# Altium footprint library SYNCBOX_V3I1.PcbLib: 251 footprints (part 8 of 16)
Each footprint in its own frame and in the unit in brackets; x right, y up, seen from the top. Pads: shape width x height; smd on the part's side, far side on the other; paste and mask are expansions set on the pad; w line width, h text height; cw(c..) or ccw(c..) is an arc to the next point about the centre after c.
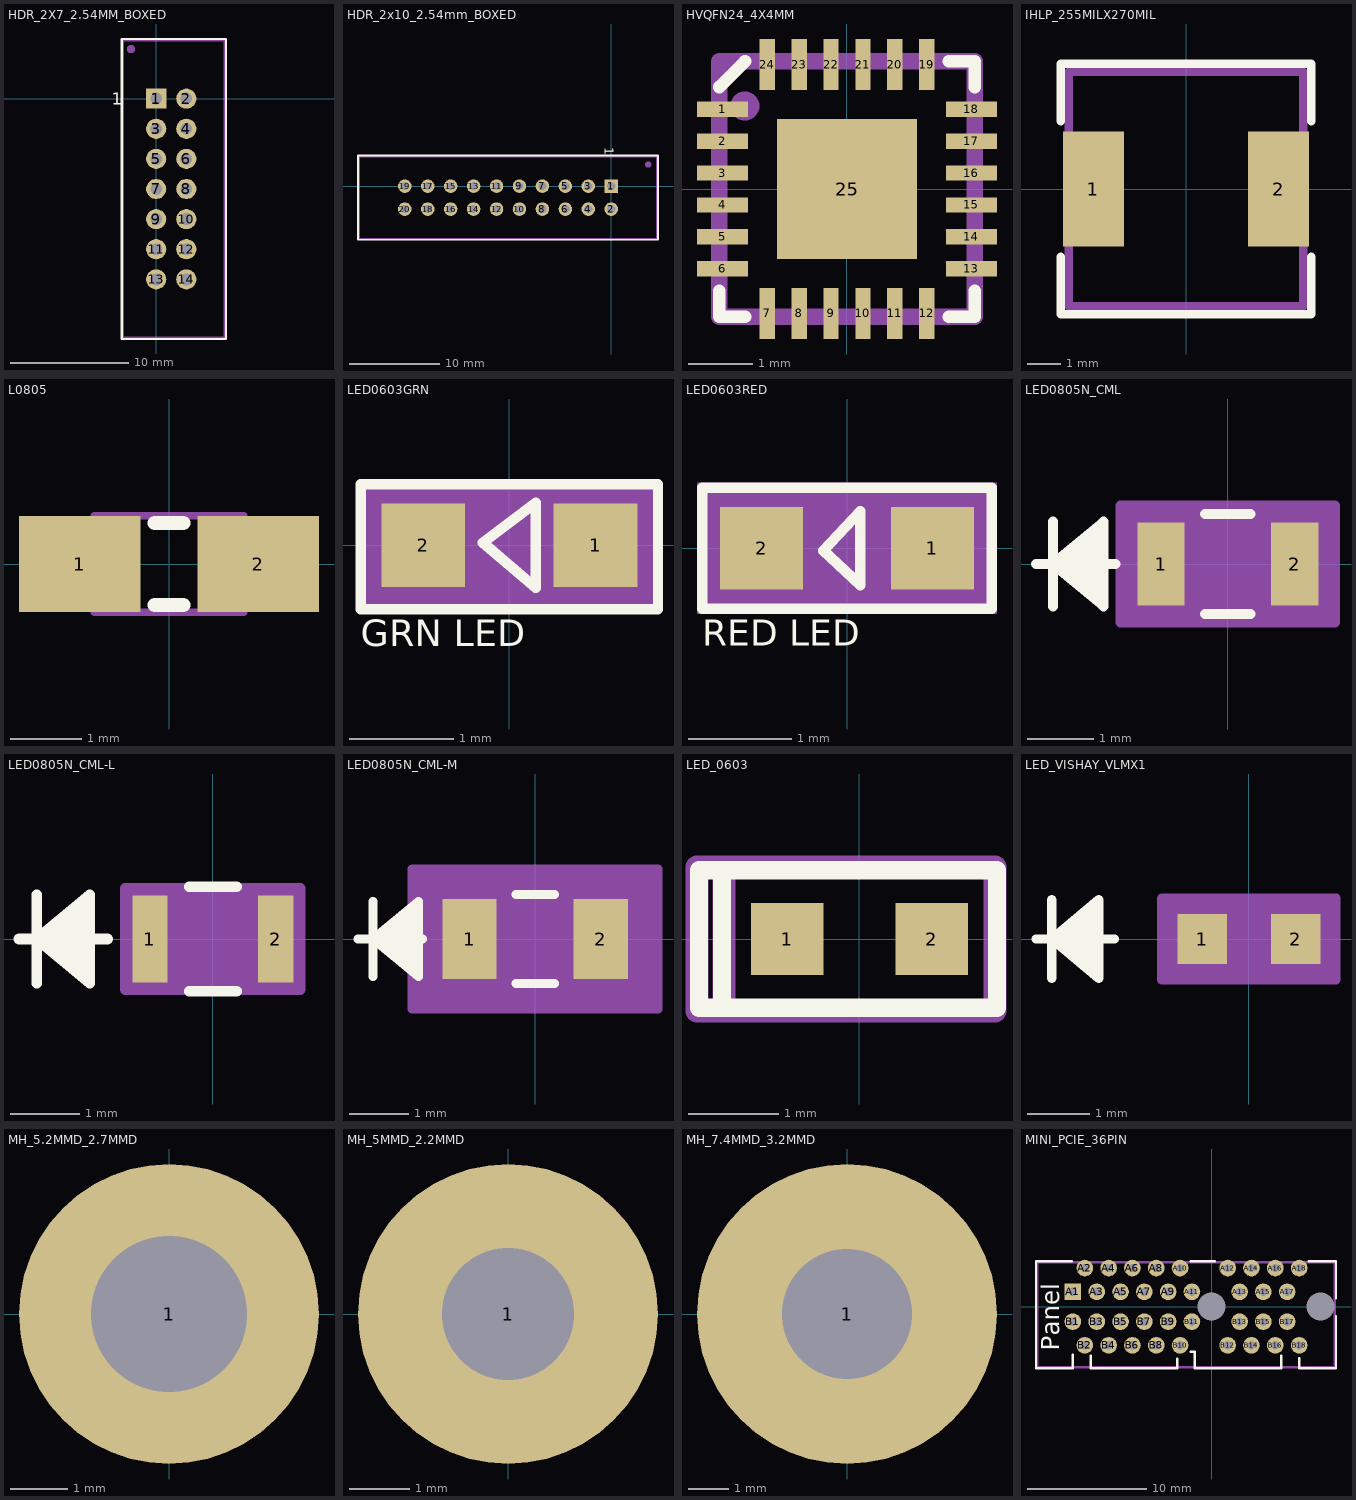
[diagram p7: the footprints below, top view; thin cyan lines are the x and y axes]

## HDR_2X7_2.54MM_BOXED [mm]
pads (14):
  rect 1.7x1.7 hole 1: 1(0,0)
  round 1.7 hole 1: 2(2.54,0) 3(0,-2.54) 4(2.54,-2.54) 5(0,-5.08) 6(2.54,-5.08) 7(0,-7.62) 8(2.54,-7.62) 9(0,-10.16) 10(2.54,-10.16) 11(0,-12.7) 12(2.54,-12.7) 13(0,-15.24) 14(2.54,-15.24)
Top Overlay:
  lines w0.2: -2.9,-20.27 5.89,-20.27 5.89,5.03 -2.9,5.03 -2.9,-20.27
  text "1" at -3.73,-0.53 h1.02
Mechanical 16:
  circle w0.5: c-2.13,4.18 r0.1
  lines w0.2: -2.8,-20.17 5.79,-20.17 5.79,4.93 -2.8,4.93 -2.8,-20.17
Mechanical 29:
  text ".Designator" at 2,-9.5 h1.52
3D body "30314-6002.stp": height 8.89, standoff -3.17, extent -2.91,-20.312 5.904,5.062

## HDR_2x10_2.54mm_BOXED [mm]
pads (20):
  rect 1.5x1.5 hole 0.9: 1(0,0)
  round 1.5 hole 0.9: 2(0,-2.54) 3(-2.54,0) 4(-2.54,-2.54) 5(-5.08,0) 6(-5.08,-2.54) 7(-7.62,0) 8(-7.62,-2.54) 9(-10.16,0) 10(-10.16,-2.54) 11(-12.7,0) 12(-12.7,-2.54) 13(-15.24,0) 14(-15.24,-2.54) 15(-17.78,0) 16(-17.78,-2.54) 17(-20.32,0) 18(-20.32,-2.54) 19(-22.86,0) 20(-22.86,-2.54)
Top Overlay:
  lines w0.2: -28.04,-5.942 5.18,-5.942 5.18,3.4 5.178,3.402 -28.04,3.402 -28.04,-5.942
  text "1" at -0.7,4.3 h1.02
Mechanical 16:
  circle w0.5: c4.1,2.4 r0.1
  lines w0.2: -27.94,-5.842 5.08,-5.842 5.08,3.302 -27.94,3.302 -27.94,-5.842
Mechanical 29:
  text ".Designator" at -13.5,-2 h1.52
3D body "c-5103308-5-b-3d.stp": height 9.9, standoff -3, extent -27.935,-5.847 5.085,3.297

## HVQFN24_4X4MM [mm]
pads (25):
  rect 0.8x0.24 smd mask+0.025: 1(-1.95,1.25) 2(-1.95,0.75) 3(-1.95,0.25) 4(-1.95,-0.25) 5(-1.95,-0.75) 6(-1.95,-1.25) 13(1.95,-1.25) 14(1.95,-0.75) 15(1.95,-0.25) 16(1.95,0.25) 17(1.95,0.75) 18(1.95,1.25)
  rect 0.24x0.8 smd mask+0.025: 7(-1.25,-1.95) 8(-0.75,-1.95) 9(-0.25,-1.95) 10(0.25,-1.95) 11(0.75,-1.95) 12(1.25,-1.95) 19(1.25,1.95) 20(0.75,1.95) 21(0.25,1.95) 22(-0.25,1.95) 23(-0.75,1.95) 24(-1.25,1.95)
  rect 2.2x2.2 smd mask+0.025: 25(0,0)
Top Overlay:
  lines w0.2: -2,-1.6 -2,-2 -1.6,-2 ; -2,1.6 -1.6,2 ; 1.6,-2 2,-2 2,-1.6 ; 1.6,2 2,2 2,1.6
Mechanical 16:
  circle w0.254: c-1.6,1.3 r0.1
  lines w0.254: -2,-2 -2,2 2,2 2,-2 -2,-2
Mechanical 29:
  text ".Designator" at -0.2,0.7 h0.6
3D body: height 1, standoff 0, extent -2,-2 2,2

## IHLP_255MILX270MIL [mil]
pads (2):
  rect 72x135 smd: 1(-109,0) 2(109,0)
Top Overlay:
  lines w10: -147.64,-80 -147.64,-147.64 147.64,-147.64 147.64,-80 ; -147.64,80 -147.64,147.64 147.64,147.64 147.64,80
Mechanical 16:
  lines w10: -137.8,-137.8 137.8,-137.8 137.8,137.8 -137.8,137.8 -137.8,-137.8
Mechanical 29:
  text ".Designator" at -43.31,-27.56 h60
3D body: height 118.11, standoff 0, extent -95.72,-130 95.77,130.01
3D body: height 118.11, standoff 0, extent -119.25,-130 -72.19,-82.85
3D body: height 118.11, standoff 0, extent -119.25,82.94 -72.1,130
3D body: height 118.11, standoff 0, extent 72.19,82.95 119.34,130.01
3D body: height 118.11, standoff 0, extent 72.2,-130 119.25,-82.85
3D body: height 118.11, standoff 0, extent 95.63,-106.43 119.34,106.57
3D body: height 118.11, standoff 0, extent -119.25,-106.42 -95.53,106.57
3D body: height 78.74, standoff 0, extent -134.93,-62.92 -119.18,63.07
3D body: height 78.74, standoff 0, extent 119.34,-62.92 135.09,63.06

## L0805 [mm]
height 1.45
pads (2):
  rect 1.7x1.35 smd: 1(-1.25,0) 2(1.25,0)
Top Overlay:
  lines w0.2: -0.2,-0.575 0.2,-0.575 ; -0.2,0.575 0.2,0.575
Mechanical 13:
  lines w0.1: -1.05,-0.675 -1.05,0.675 1.05,0.675 1.05,-0.675 -1.05,-0.675
3D body: height 1.45, standoff 0, extent -1.05,-0.675 1.05,0.675

## LED0603GRN [mm]
pads (2):
  rect 0.8x0.8 smd: 1(0.825,0) 2(-0.825,0)
Top Overlay:
  lines w0.1: -1.422,-0.61 1.422,-0.61 1.422,0.584 -1.422,0.584 -1.422,0.403 -1.422,-0.61 ; -0.254,0.025 0.254,0.406 0.254,-0.406 -0.254,0.025
  text "GRN LED" at -1.422,-0.965 h0.25
Mechanical 15:
  rectangle: -1.448,-0.584 1.397,0.61
3D body "APT1608.STEP": height 0.75, standoff 0, extent -0.759,-0.4 0.852,0.4

## LED0603RED [mm]
pads (2):
  rect 0.8x0.8 smd: 1(0.825,0) 2(-0.825,0)
Top Overlay:
  lines w0.1: -1.397,-0.584 -1.397,0.584 1.397,0.584 1.397,-0.584 -1.397,-0.584
  lines w0.102: -0.229,-0.024 0.127,0.356 0.127,-0.356 -0.229,-0.024
  text "RED LED" at -1.397,-0.94 h0.25
Mechanical 15:
  rectangle: -1.448,-0.635 1.448,0.635
3D body "APT1608.STEP": height 0.75, standoff 0, extent -0.806,-0.406 0.805,0.394

## LED0805N_CML [mil]
pads (2):
  rect 28x49 smd paste+0 mask+0: 1(-39.5,0) 2(39.5,0)
Top Overlay:
  lines w6: -113.5,0 -66.6,0 ; -103.5,-25 -103.5,25 ; -73.5,-20 -103.5,0 ; -73.5,-15 -103.5,0 ; -73.5,-10 -103.5,0 ; -73.5,-5 -103.5,0 ; -73.5,5 -103.5,0 ; -73.5,10 -103.5,0 ; -73.5,15 -103.5,0 ; -73.5,20 -103.5,0 ; -13.39,-29.5 13.39,-29.5 ; -13.39,29.5 13.39,29.5 ; -103.5,0 -73.5,-25 -73.5,25 -103.5,0
Mechanical 13:
  lines w1: -113.5,0 -63.5,0 ; -103.5,-25 -103.5,25 ; -73.5,-20 -103.5,0 ; -73.5,-15 -103.5,0 ; -73.5,-10 -103.5,0 ; -73.5,-5 -103.5,0 ; -73.5,5 -103.5,0 ; -73.5,10 -103.5,0 ; -73.5,15 -103.5,0 ; -73.5,20 -103.5,0 ; -103.5,0 -73.5,-25 -73.5,25 -103.5,0 ; -39.5,-24.5 -39.5,24.5 ; -39.5,-24.5 39.5,-24.5 ; -39.5,-24.5 -25.5,-24.5 -25.5,24.5 -39.5,24.5 ; -39.5,-24.5 -39.5,24.5 ; -39.5,24.5 39.5,24.5 ; 39.5,-24.5 39.5,24.5 ; 39.5,-24.5 39.5,24.5 ; 39.5,-24.5 25.5,-24.5 25.5,24.5 39.5,24.5
Mechanical 15:
  region: 63.5,-34.5 -63.5,-34.5 -63.5,34.5 63.5,34.5
  lines w6: -63.5,-34.5 63.5,-34.5 63.5,34.5 -63.5,34.5 -63.5,-34.5
3D body: height 10, standoff 0, extent 0,0 10,10
3D body "LED0805N_CML.step": height 30.98, standoff 0, extent -39.49,-24.49 39.49,24.49

## LED0805N_CML-L [mil]
pads (2):
  rect 20x49 smd paste+0 mask+0: 1(-35.5,0) 2(35.5,0)
Top Overlay:
  lines w6: -109.5,0 -59.5,0 ; -99.5,-25 -99.5,25 ; -69.5,-20 -99.5,0 ; -69.5,-15 -99.5,0 ; -69.5,-10 -99.5,0 ; -69.5,-5 -99.5,0 ; -69.5,5 -99.5,0 ; -69.5,10 -99.5,0 ; -69.5,15 -99.5,0 ; -69.5,20 -99.5,0 ; -13.39,-29.5 13.39,-29.5 ; -13.39,29.5 13.39,29.5 ; -99.5,0 -69.5,25 -69.5,-25 -99.5,0
Mechanical 13:
  lines w1: -109.5,0 -59.5,0 ; -99.5,-25 -99.5,25 ; -69.5,-20 -99.5,0 ; -69.5,-15 -99.5,0 ; -69.5,-10 -99.5,0 ; -69.5,-5 -99.5,0 ; -69.5,5 -99.5,0 ; -69.5,10 -99.5,0 ; -69.5,15 -99.5,0 ; -69.5,20 -99.5,0 ; -99.5,0 -69.5,25 -69.5,-25 -99.5,0 ; -39.5,-24.5 -39.5,24.5 ; -39.5,-24.5 -25.5,-24.5 -25.5,24.5 -39.5,24.5 ; -39.5,-24.5 39.5,-24.5 ; -39.5,-24.5 -39.5,24.5 ; -39.5,24.5 39.5,24.5 ; 39.5,-24.5 25.5,-24.5 25.5,24.5 39.5,24.5 ; 39.5,-24.5 39.5,24.5 ; 39.5,-24.5 39.5,24.5
Mechanical 15:
  region: 49.5,-28.5 -49.5,-28.5 -49.5,28.5 49.5,28.5
  lines w6: -49.5,-28.5 -49.5,28.5 49.5,28.5 49.5,-28.5 -49.5,-28.5
3D body: height 10, standoff 0, extent 0,0 10,10
3D body "LED0805N_CML-L.step": height 30.98, standoff 0, extent -39.48,-24.49 39.49,24.49

## LED0805N_CML-M [mil]
pads (2):
  rect 36x53 smd paste+0 mask+0: 1(-43.5,0) 2(43.5,0)
Top Overlay:
  lines w6: -117.5,0 -74.6,0 ; -107.5,-25 -107.5,25 ; -77.5,-20 -107.5,0 ; -77.5,-15 -107.5,0 ; -77.5,-10 -107.5,0 ; -77.5,-5 -107.5,0 ; -77.5,5 -107.5,0 ; -77.5,10 -107.5,0 ; -77.5,15 -107.5,0 ; -77.5,20 -107.5,0 ; -12.75,-29.5 12.75,-29.5 ; -12.75,29.5 12.75,29.5 ; -107.5,0 -77.5,25 -77.5,-25 -107.5,0
Mechanical 13:
  lines w1: -117.5,0 -67.5,0 ; -107.5,-25 -107.5,25 ; -77.5,-20 -107.5,0 ; -77.5,-15 -107.5,0 ; -77.5,-10 -107.5,0 ; -77.5,-5 -107.5,0 ; -77.5,5 -107.5,0 ; -77.5,10 -107.5,0 ; -77.5,15 -107.5,0 ; -77.5,20 -107.5,0 ; -107.5,0 -77.5,25 -77.5,-25 -107.5,0 ; -39.5,-24.5 -39.5,24.5 ; -39.5,-24.5 -25.5,-24.5 -25.5,24.5 -39.5,24.5 ; -39.5,-24.5 39.5,-24.5 ; -39.5,-24.5 -39.5,24.5 ; -39.5,24.5 39.5,24.5 ; 39.5,-24.5 25.5,-24.5 25.5,24.5 39.5,24.5 ; 39.5,-24.5 39.5,24.5 ; 39.5,-24.5 39.5,24.5
Mechanical 15:
  region: 81.5,-46.5 -81.5,-46.5 -81.5,46.5 81.5,46.5
  lines w6: -81.5,-46.5 -81.5,46.5 81.5,46.5 81.5,-46.5 -81.5,-46.5
3D body "LED0805N_CML-M.step": height 30.98, standoff 0, extent -39.48,-24.49 39.49,24.49
3D body: height 10, standoff 0, extent 0,0 10,10

## LED_0603 [mm]
pads (2):
  rect 0.8x0.8 smd: 1(-0.8,0) 2(0.8,0)
Top Overlay:
  lines w0.2: -1.524,-0.762 -1.524,0.762 ; -1.778,-0.762 1.524,-0.762 1.524,0.762 -1.778,0.762 -1.778,-0.762
Mechanical 16:
  lines w0.254: -1.5,-0.8 -1.5,0.8 ; -1.8,-0.8 -1.8,0.8 1.5,0.8 1.5,-0.8 -1.8,-0.8
Mechanical 29:
  text ".Designator" at 0.4,0.3 h0.6
3D body "LED SMD 0603.step": height 0.65, standoff 0, extent -0.85,-0.4 0.85,0.4
3D body: height 0.66, standoff 0.5, extent -0.2,-0.2 0.2,0.2

## LED_VISHAY_VLMX1 [mil]
pads (2):
  rect 31.5x32 smd paste+0 mask+0: 1(-29.75,0) 2(29.75,0)
Top Overlay:
  lines w6: -135.5,0 -85.5,0 ; -125.5,-25 -125.5,25 ; -95.5,-20 -125.5,0 ; -95.5,-15 -125.5,0 ; -95.5,-10 -125.5,0 ; -95.5,-5 -125.5,0 ; -95.5,5 -125.5,0 ; -95.5,10 -125.5,0 ; -95.5,15 -125.5,0 ; -95.5,20 -125.5,0 ; -125.5,0 -95.5,25 -95.5,-25 -125.5,0
Mechanical 13:
  lines w1: -135.5,0 -85.5,0 ; -125.5,-25 -125.5,25 ; -95.5,-20 -125.5,0 ; -95.5,-15 -125.5,0 ; -95.5,-10 -125.5,0 ; -95.5,-5 -125.5,0 ; -95.5,5 -125.5,0 ; -95.5,10 -125.5,0 ; -95.5,15 -125.5,0 ; -95.5,20 -125.5,0 ; -125.5,0 -95.5,25 -95.5,-25 -125.5,0 ; -31.5,-16 31.5,-16 31.5,16 -31.5,16 -31.5,-16
Mechanical 15:
  region: -41.5,-26 -55.5,-26 -55.5,26 -41.5,26 41.5,26 55.5,26 55.5,-26 41.5,-26
  lines w6: -55.5,-26 -55.5,26 -41.5,26 41.5,26 55.5,26 55.5,-26 41.5,-26 -41.5,-26 -55.5,-26
3D body: height 10, standoff 0, extent 0,0 10,10
3D body "LED_VISHAY_VLMX1300.stp": height 32.01, standoff 0, extent -31.5,-15.98 31.5,15.98

## MH_5.2MMD_2.7MMD [mm]
pads (1):
  round 5.2 / inner round 3.683 / far side round 5.2 hole 2.7: 1(0,0)

## MH_5MMD_2.2MMD [mm]
pads (1):
  round 5 / inner round 3.683 / far side round 5 hole 2.2: 1(0,0)

## MH_7.4MMD_3.2MMD [mm]
pads (1):
  round 7.4 / inner round 3.683 / far side round 7.4 hole 3.2 mask+0.025: 1(0,0)

## MINI_PCIE_36PIN [mm]
pads (38):
  rrect70% 0x0 hole 2.35: 1(0,0) 2(9.15,0)
  rect 1.4x1.4 hole 0.7: A1(-11.65,1.25)
  round 1.4 hole 0.7: A2(-10.65,3.25) A3(-9.65,1.25) A4(-8.65,3.25) A5(-7.65,1.25) A6(-6.65,3.25) A7(-5.65,1.25) A8(-4.65,3.25) A9(-3.65,1.25) A10(-2.65,3.25) A11(-1.65,1.25) A12(1.35,3.25) A13(2.35,1.25) A14(3.35,3.25) A15(4.35,1.25) A16(5.35,3.25) A17(6.35,1.25) A18(7.35,3.25) B1(-11.65,-1.25) B2(-10.65,-3.25) B3(-9.65,-1.25) B4(-8.65,-3.25) B5(-7.65,-1.25) B6(-6.65,-3.25) B7(-5.65,-1.25) B8(-4.65,-3.25) B9(-3.65,-1.25) B10(-2.65,-3.25) B11(-1.65,-1.25) B12(1.35,-3.25) B13(2.35,-1.25) B14(3.35,-3.25) B15(4.35,-1.25) B16(5.35,-3.25) B17(6.35,-1.25) B18(7.35,-3.25)
Top Overlay:
  lines w0.2: -11.75,3.825 -14.75,3.825 -14.75,-5.175 -11.65,-5.175 -11.65,-4.025 ; -10.15,-4.125 -10.15,-5.175 -2.9,-5.175 -2.9,-4.375 ; -1.75,-3.775 -1.4,-3.775 -1.4,-5.175 5.85,-5.175 5.85,-4.125 ; -1.75,3.825 0.25,3.825 ; 7.35,-4.325 7.35,-5.175 10.45,-5.175 10.45,-0.8 ; 8.15,3.825 10.45,3.825 10.45,0.7
  text "Panel" at -12.8,-3.7 h1.5
Mechanical 16:
  lines w0.2: -14.65,-5.075 -14.65,3.725 10.35,3.725 10.35,-5.075 -14.65,-5.075
Mechanical 29:
  text ".Designator" at -0.5,0.3 h1.52
3D body "c-4-1612163-1-h-3d.stp": height 10, standoff -5.4, extent -14.65,-5.1 10.35,3.6